# Altium footprint library Regulator$.PcbLib: 106 footprints (part 6 of 7)
Each footprint in its own frame and in the unit in brackets; x right, y up, seen from the top. Pads: shape width x height; smd on the part's side, far side on the other; paste and mask are expansions set on the pad; w line width, h text height; cw(c..) or ccw(c..) is an arc to the next point about the centre after c.
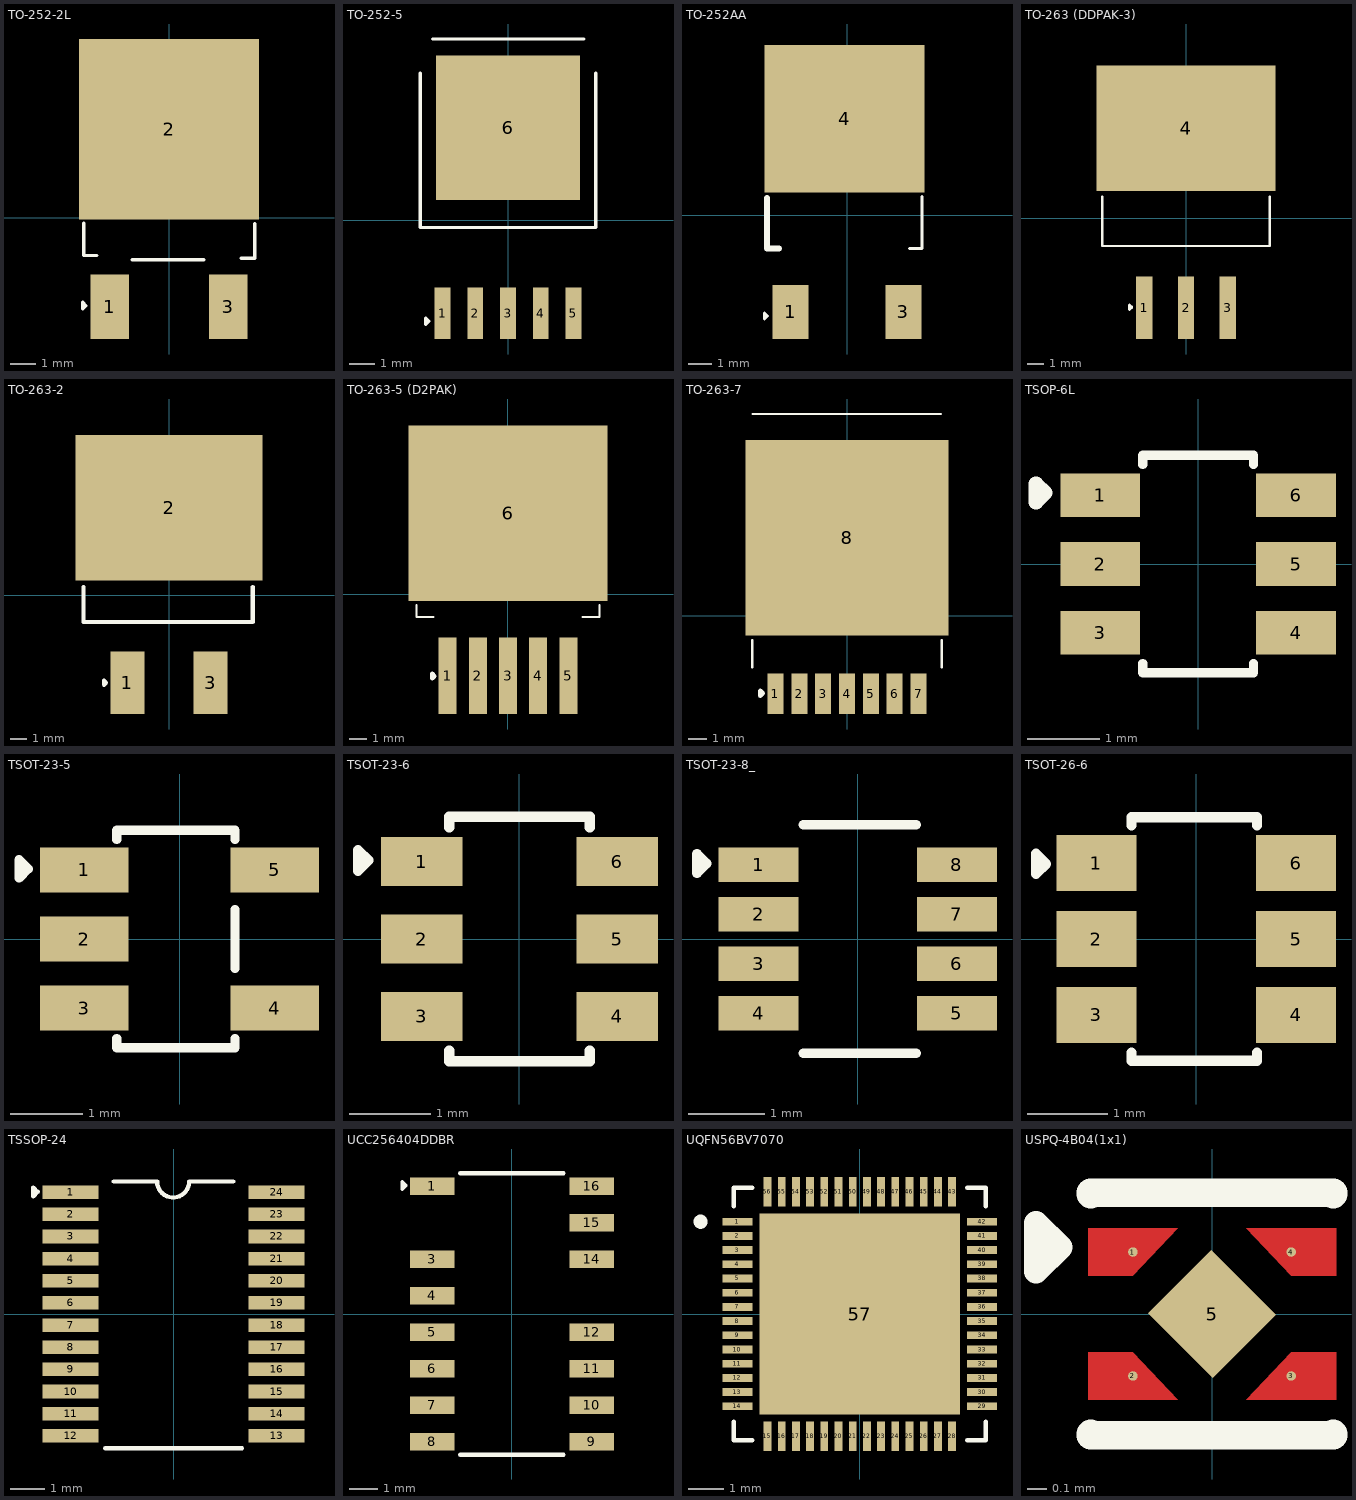
[diagram p5: the footprints below, top view; thin cyan lines are the x and y axes]

## TO-252-2L [mm]
pads (3):
  rect 1.5x2.5 smd: 1(-2.3,-3.45) 3(2.3,-3.45)
  rect 7x7 smd: 2(0,3.45)
Top Overlay:
  lines w0.127: -3.308,-0.203 -3.308,-1.457 -2.794,-1.457 ; -1.422,-1.626 1.346,-1.626 ; 2.794,-1.563 3.329,-1.563 3.329,-0.227 ; -3.353,-3.531 -3.353,-3.277 -3.226,-3.404 -3.353,-3.531
3D body "User Library-DPAK-1.STEP": height 2.34, standoff -0.07, extent -3.27,-4.311 3.27,5.627

## TO-252-5 [mm]
pads (6):
  rect 0.62x2 smd: 1(-2.54,-3.6) 2(-1.27,-3.6) 3(0,-3.6) 4(1.27,-3.6) 5(2.54,-3.6)
  rect 5.6x5.6 smd: 6(0,3.6)
Top Overlay:
  lines w0.127: -3.404,5.715 -3.404,-0.279 3.404,-0.279 3.404,5.715 ; -2.921,7.036 2.946,7.036 ; -3.2,-4.039 -3.2,-3.785 -3.073,-3.912 -3.2,-4.039
3D body "User Library-DPAK-5-1.step": height 2.4, standoff -0.01, extent -3.35,-3.886 3.35,6.98

## TO-252AA [mm]
pads (3):
  rect 1.524x2.28 smd: 1(-2.38,-4.072) 3(2.38,-4.072)
  rect 6.74x6.23 smd: 4(-0.1,4.073)
Top Overlay:
  lines w0.127: 2.629,-1.397 3.17,-1.397 3.17,0.79 ; -3.48,-4.369 -3.48,-4.115 -3.353,-4.242 -3.48,-4.369
  lines w0.254: -3.37,0.73 -3.37,-1.397 -2.87,-1.397
3D body "User Library-DPAK-1.STEP": height 2.39, standoff -0.02, extent -3.37,-4.312 3.17,5.626

## TO-263 (DDPAK-3) [mm]
pads (4):
  rect 0.99x3.79 smd: 1(-2.54,-5.44) 2(0,-5.44) 3(2.54,-5.44)
  rect 10.84x7.62 smd paste-6: 4(0,5.44)
Top Overlay:
  lines w0.127: -5.08,1.31 -5.08,-1.688 5.08,-1.688 5.08,1.31
  lines w0.2: -3.429,-5.542 -3.429,-5.288 -3.302,-5.415 -3.429,-5.542
3D body "LM340SX-12_NOPB.step": height 4.83, standoff -0.25, extent -5.08,-6.68 5.08,8.56

## TO-263-2 [mm]
pads (3):
  rect 2.08x3.81 smd: 1(-2.54,-5.335) 3(2.54,-5.335)
  rect 11.43x8.89 smd: 2(0,5.335)
Top Overlay:
  lines w0.254: -5.207,0.508 -5.207,-1.626 5.105,-1.626 5.105,0.508 ; -3.962,-5.461 -3.835,-5.334 -3.962,-5.207 -3.962,-5.461
3D body "pwr263s-35-8r20f.stp": height 4.5, standoff 0, extent -5.075,-6.596 5.025,8.794

## TO-263-5 (D2PAK) [mm]
pads (6):
  rect 1.02x4.32 smd: 1(-3.4,-4.573) 2(-1.7,-4.573) 3(0,-4.573) 4(1.7,-4.573) 5(3.4,-4.573)
  rect 11.18x9.91 smd: 6(0,4.573)
Top Overlay:
  lines w0.127: -5.156,-0.61 -5.156,-1.27 -4.191,-1.27 ; 4.191,-1.27 5.156,-1.27 5.156,-0.61
  lines w0.254: -4.267,-4.724 -4.14,-4.597 -4.267,-4.47 -4.267,-4.724
3D body "MIC29302WU-TR--3DModel-STEP-56544.STEP": height 4.83, standoff -0.25, extent -5.105,-5.779 5.055,9.131

## TO-263-7 [mm]
pads (8):
  rect 0.85x2.16 smd: 1(-3.81,-4.16) 2(-2.54,-4.16) 3(-1.27,-4.16) 4(0,-4.16) 5(1.27,-4.16) 6(2.54,-4.16) 7(3.81,-4.16)
  rect 10.8x10.41 smd: 8(0,4.16)
Top Overlay:
  lines w0.127: -5.055,-2.743 -5.055,-1.295 ; -5.029,10.744 5.004,10.744 ; 5.055,-2.743 5.055,-1.295
  lines w0.254: -4.623,-4.262 -4.623,-4.008 -4.496,-4.135 -4.623,-4.262
3D body "User Library-TO263-7-1.STEP": height 4.78, standoff -0.02, extent -5,-4.99 5,10.68

## TSOP-6L [mm]
pads (6):
  rect 1.1x0.6 smd: 1(-1.35,0.95) 2(-1.35,0) 3(-1.35,-0.95) 4(1.35,-0.95) 5(1.35,0) 6(1.35,0.95)
Top Overlay:
  lines w0.127: -0.762,-1.372 -0.762,-1.499 0.762,-1.499 0.762,-1.372 ; -0.762,1.372 -0.762,1.499 0.762,1.499 0.762,1.372
  lines w0.2: -2.235,0.853 -2.108,0.98 -2.235,1.107 -2.235,0.853
3D body "DDC0006A.stp": height 0.97, standoff 0, extent -1.4,-1.45 1.4,1.45

## TSOT-23-5 [mm]
pads (5):
  rect 1.22x0.62 smd: 1(-1.31,0.95) 2(-1.31,0) 3(-1.31,-0.95) 4(1.31,-0.95) 5(1.31,0.95)
Top Overlay:
  lines w0.127: -0.864,-1.372 -0.864,-1.499 0.762,-1.499 0.762,-1.372 ; -0.864,1.372 -0.864,1.499 0.762,1.499 0.762,1.372 ; 0.762,-0.406 0.762,0.406 ; -2.21,0.838 -2.21,1.092 -2.083,0.965 -2.21,0.838
3D body "User Library-tsot-23-5.step": height 0.95, standoff -0.03, extent -1.399,-1.452 1.399,1.448

## TSOT-23-6 [mm]
pads (6):
  rect 1x0.6 smd: 1(-1.2,0.95) 2(-1.2,0) 3(-1.2,-0.95) 4(1.2,-0.95) 5(1.2,0) 6(1.2,0.95)
Top Overlay:
  lines w0.127: -0.864,-1.372 -0.864,-1.499 0.864,-1.499 0.864,-1.372 ; -0.864,1.372 -0.864,1.499 0.864,1.499 0.864,1.372 ; -1.981,0.838 -1.981,1.092 -1.854,0.965 -1.981,0.838
3D body "User Library-TSOT-23-6(S6).step": height 1, standoff 0, extent -1.412,-1.45 1.412,1.45

## TSOT-23-8_ [mm]
pads (8):
  rect 1.05x0.45 smd: 1(-1.3,0.975) 2(-1.3,0.325) 3(-1.3,-0.325) 4(-1.3,-0.975) 5(1.3,-0.975) 6(1.3,-0.325) 7(1.3,0.325) 8(1.3,0.975)
Top Overlay:
  lines w0.127: -0.711,-1.499 0.762,-1.499 ; -0.711,1.499 0.762,1.499 ; -0.61,-1.499 0.584,-1.499 ; -2.108,0.864 -2.108,1.118 -1.981,0.991 -2.108,0.864
3D body "User Library-TSOT-23-8.STEP": height 1, standoff 0, extent -1.4,-1.45 1.4,1.45

## TSOT-26-6 [mm]
pads (6):
  rect 1x0.7 smd: 1(-1.249,0.95) 2(-1.249,0) 3(-1.249,-0.95) 4(1.249,-0.95) 5(1.249,0) 6(1.249,0.95)
Top Overlay:
  lines w0.127: -0.813,-1.524 0.762,-1.524 ; -0.813,-1.522 -0.813,-1.422 ; -0.813,1.422 -0.813,1.522 ; -0.813,1.524 0.762,1.524 ; 0.762,-1.522 0.762,-1.422 ; 0.762,1.422 0.762,1.522 ; -2.007,0.813 -1.88,0.94 -2.007,1.067 -2.007,0.813
3D body "sot-23-6.stp": height 1.1, standoff -0.01, extent -1.422,-1.46 1.422,1.46

## TSSOP-24 [mm]
pads (24):
  rect 1.65x0.4 smd paste+0 mask+0.051: 1(-3.023,3.575) 2(-3.023,2.925) 3(-3.023,2.275) 4(-3.023,1.625) 5(-3.023,0.975) 6(-3.023,0.325) 7(-3.023,-0.325) 8(-3.023,-0.975) 9(-3.023,-1.625) 10(-3.023,-2.275) 11(-3.023,-2.925) 12(-3.023,-3.575) 13(3.023,-3.575) 14(3.023,-2.925) 15(3.023,-2.275) 16(3.023,-1.625) 17(3.023,-0.975) 18(3.023,-0.325) 19(3.023,0.325) 20(3.023,0.975) 21(3.023,1.625) 22(3.023,2.275) 23(3.023,2.925) 24(3.023,3.575)
Top Overlay:
  lines w0.127: -2.007,-3.937 2.007,-3.937 ; -1.753,3.886 -0.483,3.886 ccw(c-0.013,3.886) 0.457,3.886 ; 0.483,3.886 1.753,3.886 ; -4.115,3.454 -4.115,3.708 -3.988,3.581 -4.115,3.454
3D body "UCC28951PWR.step": height 1.2, standoff 0, extent -3.2,-3.9 3.2,3.9

## UCC256404DDBR [mm]
pads (14):
  rect 1.55x0.6 smd paste+0 mask+0.05: 1(-2.775,4.445) 3(-2.775,1.905) 4(-2.775,0.635) 5(-2.775,-0.635) 6(-2.775,-1.905) 7(-2.775,-3.175) 8(-2.775,-4.445) 9(2.775,-4.445) 10(2.775,-3.175) 11(2.775,-1.905) 12(2.775,-0.635) 14(2.775,1.905) 15(2.775,3.175) 16(2.775,4.445)
Top Overlay:
  lines w0.127: -3.816,4.343 -3.689,4.47 -3.816,4.597 -3.816,4.343
  lines w0.15: -1.8,-4.9 1.8,-4.9 ; -1.8,4.9 1.8,4.9
3D body "C2867939.step": height 1.75, standoff 0, extent -3,-4.95 3,4.95

## UQFN56BV7070 [mm]
pads (57):
  rect 0.84x0.22 smd: 1(-3.445,2.6) 2(-3.445,2.2) 3(-3.445,1.8) 4(-3.445,1.4) 5(-3.445,1) 6(-3.445,0.6) 7(-3.445,0.2) 8(-3.445,-0.2) 9(-3.445,-0.6) 10(-3.445,-1) 11(-3.445,-1.4) 12(-3.445,-1.8) 13(-3.445,-2.2) 14(-3.445,-2.6) 29(3.445,-2.6) 30(3.445,-2.2) 31(3.445,-1.8) 32(3.445,-1.4) 33(3.445,-1) 34(3.445,-0.6) 35(3.445,-0.2) 36(3.445,0.2) 37(3.445,0.6) 38(3.445,1) 39(3.445,1.4) 40(3.445,1.8) 41(3.445,2.2) 42(3.445,2.6)
  rect 0.22x0.84 smd: 15(-2.6,-3.445) 16(-2.2,-3.445) 17(-1.8,-3.445) 18(-1.4,-3.445) 19(-1,-3.445) 20(-0.6,-3.445) 21(-0.2,-3.445) 22(0.2,-3.445) 23(0.6,-3.445) 24(1,-3.445) 25(1.4,-3.445) 26(1.8,-3.445) 27(2.2,-3.445) 28(2.6,-3.445) 43(2.6,3.445) 44(2.2,3.445) 45(1.8,3.445) 46(1.4,3.445) 47(1,3.445) 48(0.6,3.445) 49(0.2,3.445) 50(-0.2,3.445) 51(-0.6,3.445) 52(-1,3.445) 53(-1.4,3.445) 54(-1.8,3.445) 55(-2.2,3.445) 56(-2.6,3.445)
  rect 5.65x5.65 smd paste-4: 57(0,0)
Top Overlay:
  circle w0.2: c-4.485,2.6 r0.1
  lines w0.127: -3.55,-3.03 -3.55,-3.55 -3.03,-3.55 ; -3.55,3.03 -3.55,3.55 -3.03,3.55 ; 3.03,-3.55 3.55,-3.55 3.55,-3.03 ; 3.03,3.55 3.55,3.55 3.55,3.03
3D body "BD71847AMWV-E2.STEP": height 1, standoff 0, extent -3.5,-3.5 3.5,3.5

## USPQ-4B04(1x1) [mm]
pads (5):
  round 0.05 smd: 1(-0.415,0.325) 2(-0.415,-0.325) 3(0.415,-0.325) 4(0.415,0.325)
  rect 0.48x0.47 smd rot 135: 5(0,0)
Top Layer:
  region: 0.415,0.2 0.18,0.45 0.65,0.45 0.65,0.2
  region: -0.415,-0.2 -0.18,-0.45 -0.65,-0.45 -0.65,-0.2
  region: 0.18,-0.45 0.415,-0.2 0.65,-0.2 0.65,-0.45
  region: -0.18,0.45 -0.415,0.2 -0.65,0.2 -0.65,0.45
Top Overlay:
  lines w0.127: -0.923,0.223 -0.923,0.477 -0.796,0.35 -0.923,0.223
  lines w0.15: -0.635,-0.629 -0.635,-0.635 -0.5,-0.635 0.5,-0.635 0.635,-0.635 0.635,-0.629 ; -0.635,0.629 -0.635,0.635 0.635,0.635 0.635,0.629
3D body "C216662.step": height 0.61, standoff 0, extent -0.51,-0.5 0.51,0.5